# Altium footprint library OLED.PcbLib: 1 footprints
Each footprint in its own frame and in the unit in brackets; x right, y up, seen from the top. Pads: shape width x height; smd on the part's side, far side on the other; paste and mask are expansions set on the pad; w line width, h text height; cw(c..) or ccw(c..) is an arc to the next point about the centre after c.
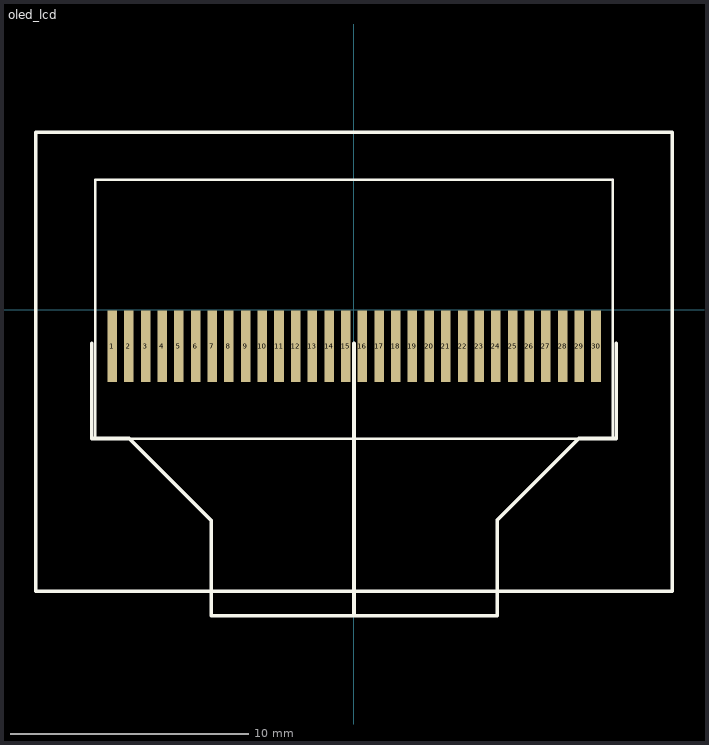
[diagram p0: the footprint, top view; thin cyan lines are the x and y axes]

## oled_lcd [mm]
pads (30):
  rect 0.4x3 smd: 1(-10.146,-1.518) 2(-9.446,-1.518) 3(-8.746,-1.518) 4(-8.046,-1.518) 5(-7.346,-1.518) 6(-6.646,-1.518) 7(-5.946,-1.518) 8(-5.246,-1.518) 9(-4.546,-1.518) 10(-3.846,-1.518) 11(-3.146,-1.518) 12(-2.446,-1.518) 13(-1.746,-1.518) 14(-1.046,-1.518) 15(-0.346,-1.518) 16(0.354,-1.518) 17(1.054,-1.518) 18(1.754,-1.518) 19(2.454,-1.518) 20(3.154,-1.518) 21(3.854,-1.518) 22(4.554,-1.518) 23(5.254,-1.518) 24(5.954,-1.518) 25(6.654,-1.518) 26(7.354,-1.518) 27(8.054,-1.518) 28(8.754,-1.518) 29(9.454,-1.518) 30(10.154,-1.518)
Top Overlay:
  lines w0.1: 10.856,-5.404 -10.858,-5.404 -10.859,5.459 10.859,5.459 ; 10.859,-5.4 10.859,5.459
  lines w0.15: -10.999,-1.395 -10.999,-5.395 -9.43,-5.395 -5.997,-8.828 -5.997,-12.828 6.003,-12.828 6.003,-8.828 9.436,-5.395 11.001,-5.395 11.001,-1.395 ; 0,-11.811 0.508,-11.811 ; 0.001,-12.776 0.001,-1.395 ; -13.349,-11.811 -13.349,7.449 13.351,7.449 13.351,-11.811 -13.349,-11.811
Mechanical 1:
  lines w0.1: 10.856,-5.404 10.859,-5.4 ; 10.859,5.459 10.859,5.459 ; -10.859,-5.403 -10.858,-5.404
3D body: height 1.5, standoff 0.8, extent -10.859,-5.403 10.859,5.461